# Altium footprint library PCB_ConnectorHDR.PcbLib: 139 footprints (part 3 of 9)
Each footprint in its own frame and in the unit in brackets; x right, y up, seen from the top. Pads: shape width x height; smd on the part's side, far side on the other; paste and mask are expansions set on the pad; w line width, h text height; cw(c..) or ccw(c..) is an arc to the next point about the centre after c.
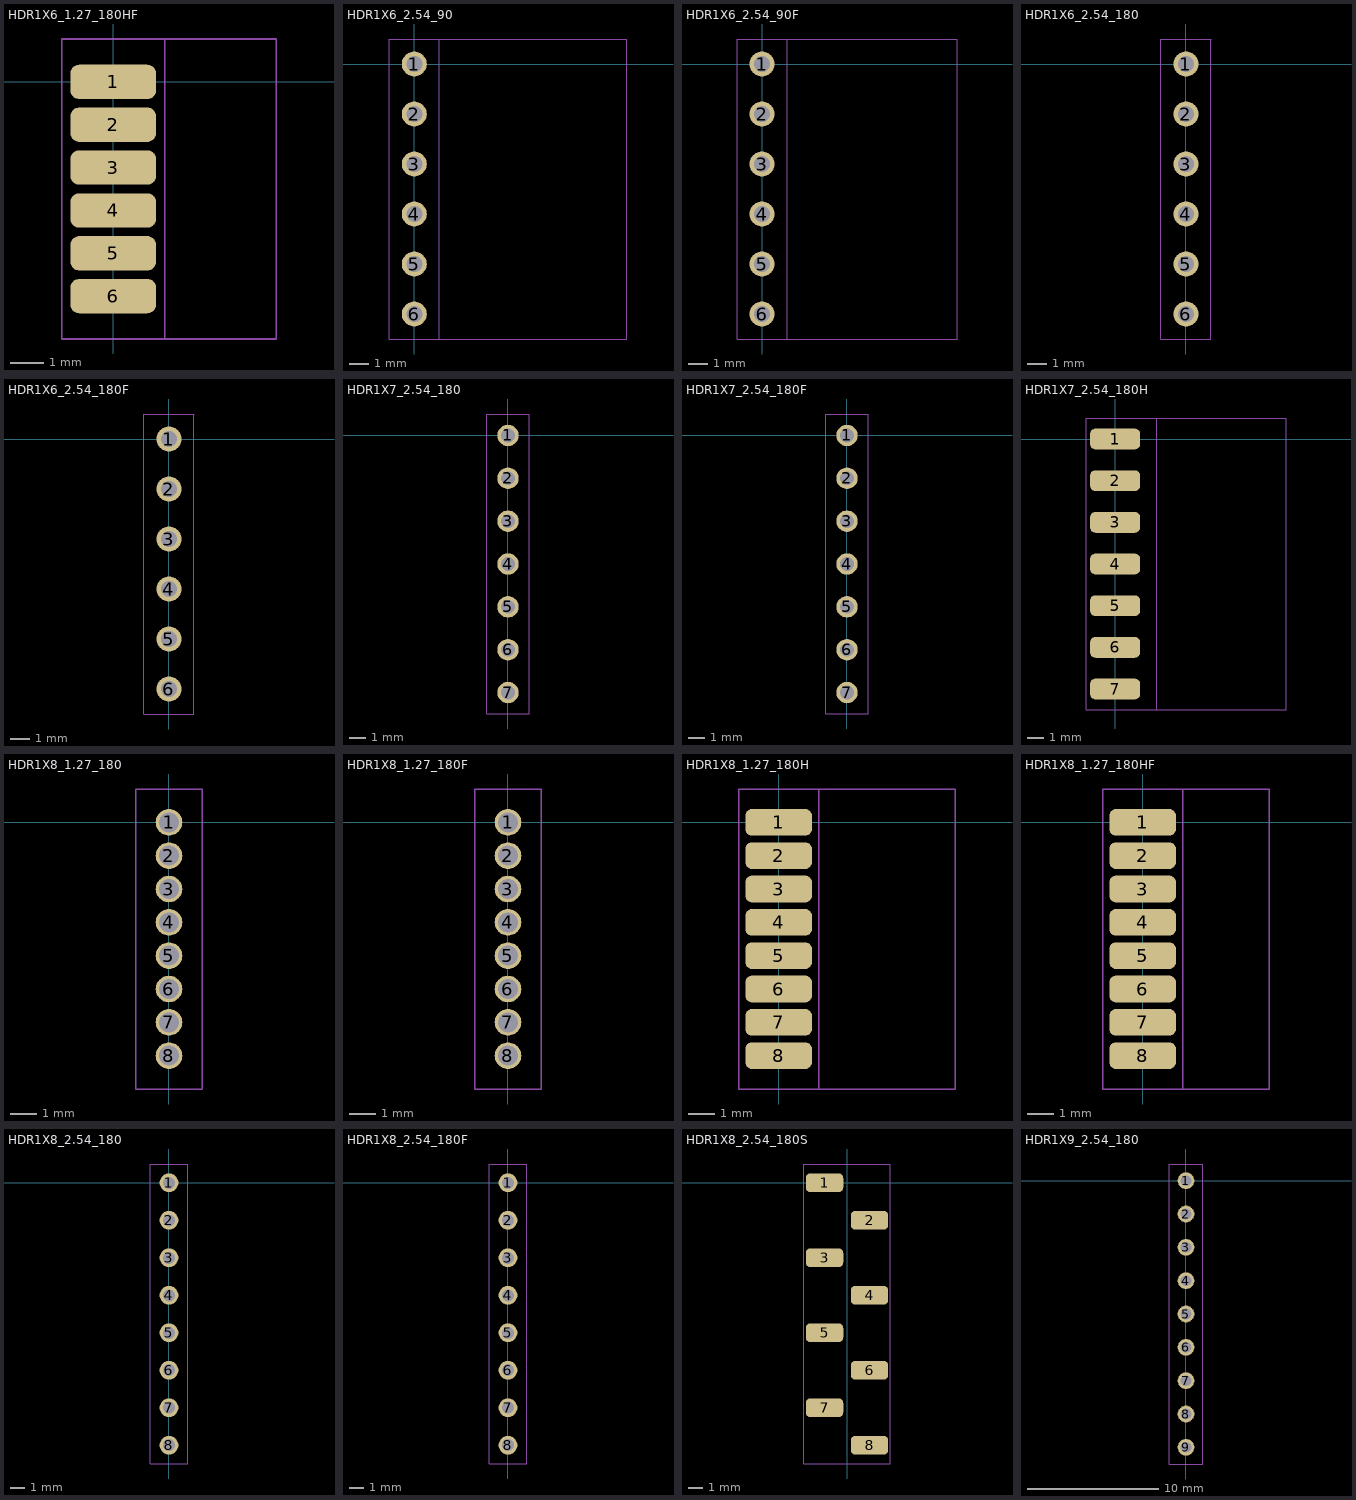
[diagram p2: the footprints below, top view; thin cyan lines are the x and y axes]

## HDR1X6_1.27_180HF [mil]
height 169.29
pads (6):
  rrect50% 100x40 smd: 1(0,0) 2(0,-50) 3(0,-100) 4(0,-150) 5(0,-200) 6(0,-250)
Mechanical 13:
  lines w2: -60,-300 -60,50 190,50 190,-300 -60,-300
T-Component:
  lines w2: -60,-300 60,-300 60,50 -60,50 -60,-300
  text ".Designator" at -31,-145 h80
3D body "female_header_a-bl127-eg-g06d.stp": height 71.43, standoff 0.57, extent -38.35,-282.88 190,32.88

## HDR1X6_2.54_90 [mil]
height 169.29
pads (6):
  round 50 hole 32: 1(0,0) 2(0,-100) 3(0,-200) 4(0,-300) 5(0,-400) 6(0,-500)
Mechanical 13:
  lines w2: -50,-550 -50,50 425,50 425,-550 -50,-550
T-Component:
  lines w2: -50,-550 -50,50 50,50 50,-550 -50,-550
  text ".Designator" at -31,-270 h80
3D body "pin_header_aw140-ea-g06g.stp": height 99.21, standoff -93.7, extent -14.96,-546.06 423.62,46.07

## HDR1X6_2.54_90F [mil]
height 169.29
pads (6):
  round 50 hole 32: 1(0,0) 2(0,-100) 3(0,-200) 4(0,-300) 5(0,-400) 6(0,-500)
Mechanical 13:
  lines w2: -50,-550 -50,50 390,50 390,-550 -50,-550
T-Component:
  lines w2: -50,-550 50,-550 50,50 -50,50 -50,-550
  text ".Designator" at -31,-270 h80
3D body "female_header_a-bl254-ea-g06d.stp": height 99.21, standoff -125.2, extent -10,-554.92 386.06,54.92

## HDR1X6_2.54_180 [mil]
height 169.29
pads (6):
  round 50 hole 32: 1(0,0) 2(0,-100) 3(0,-200) 4(0,-300) 5(0,-400) 6(0,-500)
Mechanical 13:
  lines w2: -50,-550 -50,50 50,50 50,-550 -50,-550
T-Component:
  lines w2: -50,-550 -50,50 50,50 50,-550 -50,-550
  text ".Designator" at -31,-270 h80
3D body "pin_header_aw140-eg-g06d.stp": height 322.83, standoff -118.11, extent -49.18,-550 49.18,50

## HDR1X6_2.54_180F [mil]
height 169.29
pads (6):
  round 50 hole 32: 1(0,0) 2(0,-100) 3(0,-200) 4(0,-300) 5(0,-400) 6(0,-500)
Mechanical 13:
  lines w2: -50,-550 50,-550 50,50 -50,50 -50,-550
T-Component:
  lines w2: -50,-550 -50,50 50,50 50,-550 -50,-550
  text ".Designator" at -31,-270 h80
3D body "female_header_a-bl254-eg-g06d.stp": height 334.65, standoff -125.98, extent -49.21,-554.84 49.21,55

## HDR1X7_2.54_180 [mil]
height 169.29
pads (7):
  round 50 hole 32: 1(0,0) 2(0,-100) 3(0,-200) 4(0,-300) 5(0,-400) 6(0,-500) 7(0,-600)
Mechanical 13:
  lines w2: -50,-650 50,-650 50,50 -50,50 -50,-650
T-Component:
  lines w2: -50,-650 50,-650 50,50 -50,50 -50,-650
  text ".Designator" at -31,-320 h80
3D body "pin_header_aw140-eg-g07d.stp": height 322.83, standoff -118.11, extent -49.18,-650 49.18,50

## HDR1X7_2.54_180F [mil]
height 169.29
pads (7):
  round 50 hole 32: 1(0,0) 2(0,-100) 3(0,-200) 4(0,-300) 5(0,-400) 6(0,-500) 7(0,-600)
Mechanical 13:
  lines w2: -50,-650 -50,50 50,50 50,-650 -50,-650
T-Component:
  lines w2: -50,-650 -50,50 50,50 50,-650 -50,-650
  text ".Designator" at -31,-320 h80
3D body "female_header_a-bl254-eg-g07d.stp": height 334.65, standoff -125.98, extent -49.21,-654.91 49.22,54.92

## HDR1X7_2.54_180H [mil]
height 169.29
pads (7):
  rrect50% 120x50 smd: 1(0,0) 2(0,-100) 3(0,-200) 4(0,-300) 5(0,-400) 6(0,-500) 7(0,-600)
Mechanical 13:
  lines w2: -70,-650 410,-650 410,50 -70,50 -70,-650
T-Component:
  lines w2: -70,-650 -70,50 100,50 100,-650 -70,-650
  text ".Designator" at -31,-320 h80
3D body "pin_header_aw140-eg-g07d.stp": height 61.32, standoff -37.05, extent -35,-650 405.95,50

## HDR1X8_1.27_180 [mil]
height 169.29
pads (8):
  round 40 hole 30: 1(0,0) 2(0,-50) 3(0,-100) 4(0,-150) 5(0,-200) 6(0,-250) 7(0,-300) 8(0,-350)
Mechanical 13:
  lines w2: -50,-400 -50,50 50,50 50,-400 -50,-400
T-Component:
  lines w2: -50,-400 -50,50 50,50 50,-400 -50,-400
  text ".Designator" at -31,-195 h80
3D body "pin_header_a-sl127-eg-z08d.stp": height 210.24, standoff -102.36, extent -49.21,-374.99 49.21,25.01

## HDR1X8_1.27_180F [mil]
height 169.29
pads (8):
  round 40 hole 30: 1(0,0) 2(0,-50) 3(0,-100) 4(0,-150) 5(0,-200) 6(0,-250) 7(0,-300) 8(0,-350)
Mechanical 13:
  lines w2: -50,-400 -50,50 50,50 50,-400 -50,-400
T-Component:
  lines w2: -50,-400 -50,50 50,50 50,-400 -50,-400
  text ".Designator" at -31,-195 h80
3D body "female_header_a-bl127-eg-z08d.stp": height 133.86, standoff -94.49, extent -35.43,-382.88 35.43,32.87

## HDR1X8_1.27_180H [mil]
height 169.29
pads (8):
  rrect50% 100x40 smd: 1(0,0) 2(0,-50) 3(0,-100) 4(0,-150) 5(0,-200) 6(0,-250) 7(0,-300) 8(0,-350)
Mechanical 13:
  lines w2: -60,-400 -60,50 265,50 265,-400 -60,-400
T-Component:
  lines w2: -60,-400 -60,50 60,50 60,-400 -60,-400
  text ".Designator" at -31,-195 h80
3D body "pin_header_a-sl127-eg-g08d.stp": height 49.21, standoff -49.21, extent -47.36,-375 265.24,25

## HDR1X8_1.27_180HF [mil]
height 169.29
pads (8):
  rrect50% 100x40 smd: 1(0,0) 2(0,-50) 3(0,-100) 4(0,-150) 5(0,-200) 6(0,-250) 7(0,-300) 8(0,-350)
Mechanical 13:
  lines w2: -60,-400 -60,50 190,50 190,-400 -60,-400
T-Component:
  lines w2: -60,-400 -60,50 60,50 60,-400 -60,-400
  text ".Designator" at -31,-195 h80
3D body "female_header_a-bl127-eg-z08d.stp": height 71.43, standoff 0.57, extent -39.48,-382.88 188.87,32.87

## HDR1X8_2.54_180 [mil]
height 169.29
pads (8):
  round 50 hole 32: 1(0,0) 2(0,-100) 3(0,-200) 4(0,-300) 5(0,-400) 6(0,-500) 7(0,-600) 8(0,-700)
Mechanical 13:
  lines w2: -50,-750 50,-750 50,50 -50,50 -50,-750
T-Component:
  lines w2: -50,-750 -50,50 50,50 50,-750 -50,-750
  text ".Designator" at -31,-370 h80
3D body "pin_header_aw140-eg-g08d.stp": height 322.83, standoff -118.11, extent -49.18,-750 49.18,49.99

## HDR1X8_2.54_180F [mil]
height 169.29
pads (8):
  round 50 hole 32: 1(0,0) 2(0,-100) 3(0,-200) 4(0,-300) 5(0,-400) 6(0,-500) 7(0,-600) 8(0,-700)
Mechanical 13:
  lines w2: -50,-750 50,-750 50,50 -50,50 -50,-750
T-Component:
  lines w2: -50,-750 50,-750 50,50 -50,50 -50,-750
  text ".Designator" at -31,-370 h80
3D body "female_header_a-bl254-eg-g08d.stp": height 334.65, standoff -125.98, extent -49.21,-754.84 49.21,55

## HDR1X8_2.54_180S [mil]
height 169.29
pads (8):
  rrect50% 100x50 smd: 1(-60,0) 2(60,-100) 3(-60,-200) 4(60,-300) 5(-60,-400) 6(60,-500) 7(-60,-600) 8(60,-700)
Mechanical 13:
  lines w2: -115,-750 -115,50 115,50 115,-750 -115,-750
T-Component:
  lines w2: -115,-750 115,-750 115,50 -115,50 -115,-750
  text ".Designator" at -31,-370 h80
3D body "pin_header_a-sl254-eg-g08mp1.stp": height 386.46, standoff -0.94, extent -98.56,-746.06 98.29,53.94

## HDR1X9_2.54_180 [mil]
height 169.29
pads (9):
  round 50 hole 32: 1(0,0) 2(0,-100) 3(0,-200) 4(0,-300) 5(0,-400) 6(0,-500) 7(0,-600) 8(0,-700) 9(0,-800)
Mechanical 13:
  lines w2: -50,-850 50,-850 50,50 -50,50 -50,-850
T-Component:
  lines w2: -50,-850 -50,50 50,50 50,-850 -50,-850
  text ".Designator" at -31,-420 h80
3D body "pin_header_aw140-eg-g09d.stp": height 322.83, standoff -118.11, extent -49.18,-849.99 49.18,50